# Altium integrated library OK0110_Motorized_Door_Lock_V2.0.IntLib: 45 symbols
Pins are listed as number, name and electrical type; pins without a type are passive.

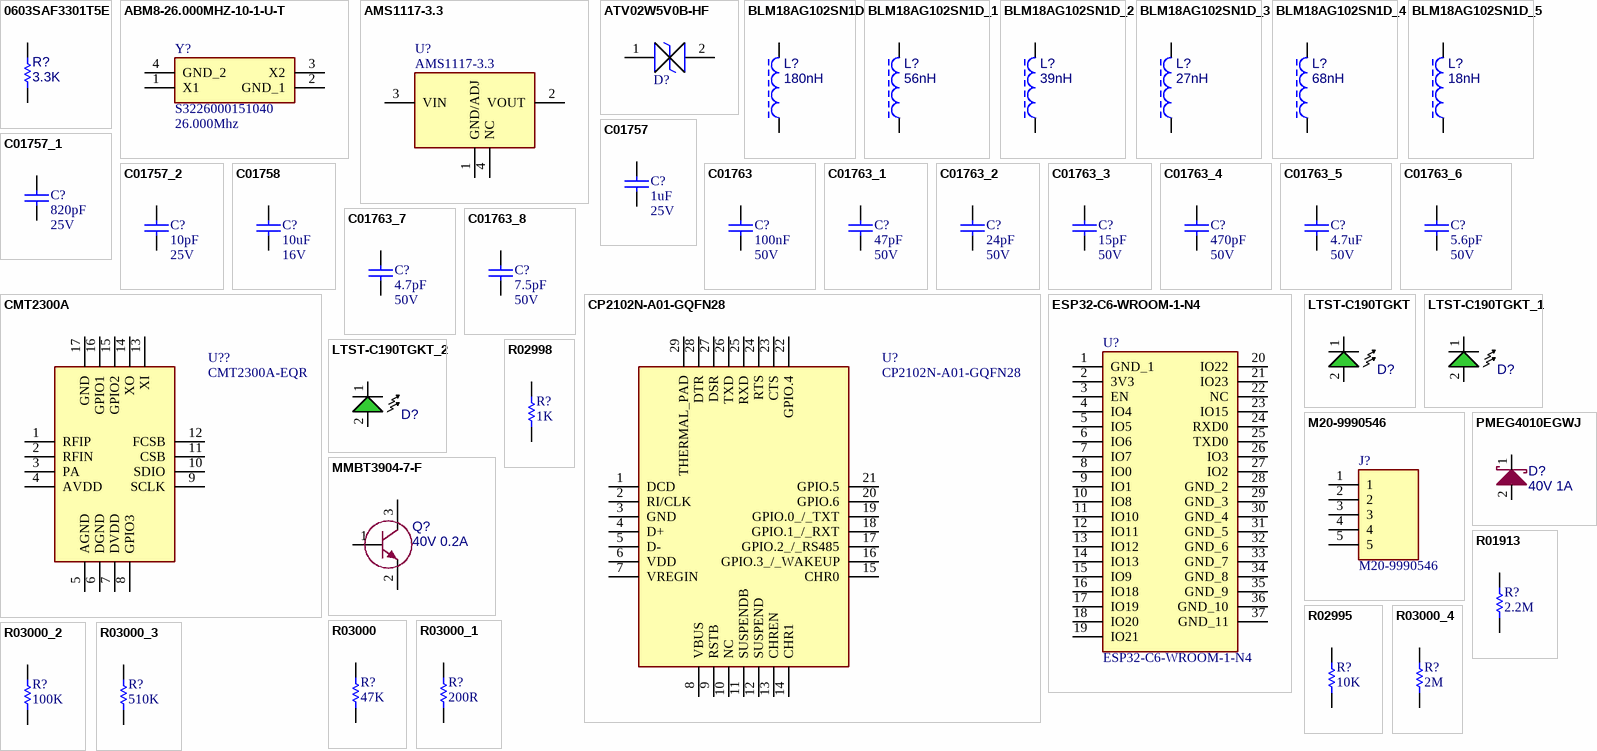
[diagram p0: symbols 0603SAF3301T5E to R03000_4]

## 0603SAF3301T5E
designator R?  value 3.3K  (hidden comment: 0603SAF3301T5E)
RES.(1608) 0603 3.3K Ohms 1% 1/10W 100PPM SMT; Manufacturer: YAGEO; Manufacturer Part Number: RC0603FR-073K74L
footprint RES_0603
pins: 1, 2

## ABM8-26.000MHZ-10-1-U-T
designator Y?, comment S3226000151040  value 26.000Mhz
CRYSTAL 26MHz 15pF SMD; Manufacturer_Name: JGHC; Datasheet Link: https://abracon.com/Resonators/abm8.pdf; Manufacturer_Part_Number: S3226000151040; Mouser Part Number: 815-ABM8-26-T; Mouser Price/Stock: https://www.mouser.co.uk/ProductDetail/ABRACON/ABM8-26.000MHZ-10-1-U-T?qs=76dmnhCH%2FMP1JRP6EvWbSw%3D%3D; Arrow Part Number: ABM8-26.000MHZ-10-1-U-T; Arrow Price/Stock: https://www.arrow.com/en/products/abm8-26.000mhz-10-1-u-t/abracon?utm_currency=USD&region=nac
footprint ABM810000MHZ12D2W
pins: 1 X1, 2 GND_1, 3 X2, 4 GND_2

## AMS1117-3.3
designator U?
Linear Voltage Regulator IC Positive Fixed 1 Output 1A SOT-223-3L; Manufacturer: Advanced; Manufacturer Part Number: AMS1117-3.3
footprint SOT229P700X180-4N
pins: 1 GND/ADJ, 2 VOUT, 3 VIN, 4 NC

## ATV02W5V0B-HF
designator D?  (value not drawn)
9.2V Clamp 21.74A Ipp Tvs Diode Surface Mount SOD-123F; Manufacturer: Comchip Technology; Manufacturer Part Number: ATV02W5V0B-HF
footprint SODFL3718X130N
pins: 1, 2

## BLM18AG102SN1D
designator L?  value 180nH  (hidden comment: BLM18AG102SN1D)
FERRITE BEAD 0603 1K 400MA MURATA; Package: 0603 (1608 Metric); Manufacturer: MURATA; Manufacturer Part Number: BLM18AG102SN1D; Supplier Part Number 1: BLM18AG102SN1D; Supplier Part Number 2: 490-1015-2-ND; Supplier Part Number 3: 81-BLM11A102S; Supplier 1: OZDISAN; Supplier 2: DIGIKEY; Supplier 3: MOUSER
footprint RES_0603
pins: 1, 2

## BLM18AG102SN1D_1
designator L?, comment value 56nH  (hidden comment: BLM18AG102SN1D)
FERRITE BEAD 0603 1K 400MA MURATA; Package: 0603 (1608 Metric); Manufacturer: MURATA; Manufacturer Part Number: BLM18AG102SN1D; Supplier Part Number 1: BLM18AG102SN1D; Supplier Part Number 2: 490-1015-2-ND; Supplier Part Number 3: 81-BLM11A102S; Supplier 1: OZDISAN; Supplier 2: DIGIKEY; Supplier 3: MOUSER
footprint RES_0603
pins: 1, 2

## BLM18AG102SN1D_2
designator L?, comment value 39nH  (hidden comment: BLM18AG102SN1D)
FERRITE BEAD 0603 1K 400MA MURATA; Package: 0603 (1608 Metric); Manufacturer: MURATA; Manufacturer Part Number: BLM18AG102SN1D; Supplier Part Number 1: BLM18AG102SN1D; Supplier Part Number 2: 490-1015-2-ND; Supplier Part Number 3: 81-BLM11A102S; Supplier 1: OZDISAN; Supplier 2: DIGIKEY; Supplier 3: MOUSER
footprint RES_0603
pins: 1, 2

## BLM18AG102SN1D_3
designator L?, comment value 27nH  (hidden comment: BLM18AG102SN1D)
FERRITE BEAD 0603 1K 400MA MURATA; Package: 0603 (1608 Metric); Manufacturer: MURATA; Manufacturer Part Number: BLM18AG102SN1D; Supplier Part Number 1: BLM18AG102SN1D; Supplier Part Number 2: 490-1015-2-ND; Supplier Part Number 3: 81-BLM11A102S; Supplier 1: OZDISAN; Supplier 2: DIGIKEY; Supplier 3: MOUSER
footprint RES_0603
pins: 1, 2

## BLM18AG102SN1D_4
designator L?, comment value 68nH  (hidden comment: BLM18AG102SN1D)
FERRITE BEAD 0603 1K 400MA MURATA; Package: 0603 (1608 Metric); Manufacturer: MURATA; Manufacturer Part Number: BLM18AG102SN1D; Supplier Part Number 1: BLM18AG102SN1D; Supplier Part Number 2: 490-1015-2-ND; Supplier Part Number 3: 81-BLM11A102S; Supplier 1: OZDISAN; Supplier 2: DIGIKEY; Supplier 3: MOUSER
footprint RES_0603
pins: 1, 2

## BLM18AG102SN1D_5
designator L?, comment value 18nH  (hidden comment: BLM18AG102SN1D)
FERRITE BEAD 0603 1K 400MA MURATA; Package: 0603 (1608 Metric); Manufacturer: MURATA; Manufacturer Part Number: BLM18AG102SN1D; Supplier Part Number 1: BLM18AG102SN1D; Supplier Part Number 2: 490-1015-2-ND; Supplier Part Number 3: 81-BLM11A102S; Supplier 1: OZDISAN; Supplier 2: DIGIKEY; Supplier 3: MOUSER
footprint RES_0603
pins: 1, 2

## C01757
designator C?, comment value 1uF  Voltage: 25V  (hidden comment: CL10A105KA8NNNC)
CAP CER 1UF 25VDC %10 X5R SMD; Manufacturer: Samsung; Manufacturer Part Number: CL10A105KA8NNNC
footprint CAP_0603
pins: 1, 2

## C01757_1
designator C?, comment value 820pF  Voltage: 25V  (hidden comment: CL10A105KA8NNNC)
CAP CER 1UF 25VDC %10 X5R SMD; Manufacturer: Samsung; Manufacturer Part Number: CL10A105KA8NNNC
footprint CAP_0603
pins: 1, 2

## C01757_2
designator C?, comment value 10pF  Voltage: 25V  (hidden comment: CL10A105KA8NNNC)
CAP CER 1UF 25VDC %10 X5R SMD; Manufacturer: Samsung; Manufacturer Part Number: CL10A105KA8NNNC
footprint CAP_0603
pins: 1, 2

## C01758
designator C?, comment value 10uF  Voltage: 16V  (hidden comment: CAP)
CAP CER 10UF 16VDC %10 X5R SMD; Manufacturer: Samsung; Manufacturer Part Number: CL21A106KOQNNNE
footprint CAP_0805
pins: 1, 2

## C01763
designator C?, comment value 100nF  Voltage: 50V  (hidden comment: CAP)
CAP CER 100nF 50VDC %10 X7R SMD; Manufacturer: Samsung; Manufacturer Part Number: CL10B104KB8NNNL
footprint CAP_0603
pins: 1, 2

## C01763_1
designator C?, comment value 47pF  Voltage: 50V  (hidden comment: CAP)
CAP CER 100nF 50VDC %10 X7R SMD; Manufacturer: Samsung; Manufacturer Part Number: CL10B104KB8NNNL
footprint CAP_0603
pins: 1, 2

## C01763_2
designator C?, comment value 24pF  Voltage: 50V  (hidden comment: CAP)
CAP CER 100nF 50VDC %10 X7R SMD; Manufacturer: Samsung; Manufacturer Part Number: CL10B104KB8NNNL
footprint CAP_0603
pins: 1, 2

## C01763_3
designator C?, comment value 15pF  Voltage: 50V  (hidden comment: CAP)
CAP CER 100nF 50VDC %10 X7R SMD; Manufacturer: Samsung; Manufacturer Part Number: CL10B104KB8NNNL
footprint CAP_0603
pins: 1, 2

## C01763_4
designator C?, comment value 470pF  Voltage: 50V  (hidden comment: CAP)
CAP CER 100nF 50VDC %10 X7R SMD; Manufacturer: Samsung; Manufacturer Part Number: CL10B104KB8NNNL
footprint CAP_0603
pins: 1, 2

## C01763_5
designator C?, comment value 4.7uF  Voltage: 50V  (hidden comment: CAP)
CAP CER 100nF 50VDC %10 X7R SMD; Manufacturer: Samsung; Manufacturer Part Number: CL10B104KB8NNNL
footprint CAP_0603
pins: 1, 2

## C01763_6
designator C?, comment value 5.6pF  Voltage: 50V  (hidden comment: CAP)
CAP CER 100nF 50VDC %10 X7R SMD; Manufacturer: Samsung; Manufacturer Part Number: CL10B104KB8NNNL
footprint CAP_0603
pins: 1, 2

## C01763_7
designator C?, comment value 4.7pF  Voltage: 50V  (hidden comment: CAP)
CAP CER 100nF 50VDC %10 X7R SMD; Manufacturer: Samsung; Manufacturer Part Number: CL10B104KB8NNNL
footprint CAP_0603
pins: 1, 2

## C01763_8
designator C?, comment value 7.5pF  Voltage: 50V  (hidden comment: CAP)
CAP CER 100nF 50VDC %10 X7R SMD; Manufacturer: Samsung; Manufacturer Part Number: CL10B104KB8NNNL
footprint CAP_0603
pins: 1, 2

## CMT2300A
designator U??, comment CMT2300A-EQR
Ultra-low-power Sub-1GHz RF transceiver; Manufacturer_Name: Hope Microelectronics; Datasheet Link: http://www.cmostek.com/download/CMT2300A-CN-Rev0.7.pdf; Height: 0.8mm; Manufacturer_Part_Number: CMT2300A-EQR
footprint QFN50P300X300X80-17N-D
pins: 1 RFIP, 2 RFIN, 3 PA, 4 AVDD, 5 AGND, 6 DGND, 7 DVDD, 8 GPIO3, 9 SCLK, 10 SDIO, 11 CSB, 12 FCSB, 13 XI, 14 XO, 15 GPIO2, 16 GPIO1, 17 GND

## CP2102N-A01-GQFN28
designator U?
USB Bridge, USB to UART USB 2.0 UART Interface 28-QFN (5x5); Manufacturer: Silicon Labs; Manufacturer Part Number: CP2102N-A01-GQFN28
footprint QFN50P500X500X80-29N-D
pins: 1 DCD, 2 RI/CLK, 3 GND, 4 D+, 5 D-, 6 VDD, 7 VREGIN, 8 VBUS, 9 RSTB, 10 NC, 11 SUSPENDB, 12 SUSPEND, 13 CHREN, 14 CHR1, 15 CHR0, 16 GPIO.3_/_WAKEUP, 17 GPIO.2_/_RS485, 18 GPIO.1_/_RXT, 19 GPIO.0_/_TXT, 20 GPIO.6, 21 GPIO.5, 22 GPIO.4, 23 CTS, 24 RTS, 25 RXD, 26 TXD, 27 DSR, 28 DTR, 29 THERMAL_PAD

## ESP32-C6-WROOM-1-N4
designator U?
Manufacturer: Espressif Systems; Manufacturer Part Number: ESP32-C6-WROOM-1-N4
footprint ESP32C6WROOM1N4
pins: 1 GND_1, 2 3V3, 3 EN, 4 IO4, 5 IO5, 6 IO6, 7 IO7, 8 IO0, 9 IO1, 10 IO8, 11 IO10, 12 IO11, 13 IO12, 14 IO13, 15 IO9, 16 IO18, 17 IO19, 18 IO20, 19 IO21, 20 IO22, 21 IO23, 22 NC, 23 IO15, 24 RXD0, 25 TXD0, 26 IO3, 27 IO2, 28 GND_2, 29 GND_3, 30 GND_4, 31 GND_5, 32 GND_6, 33 GND_7, 34 GND_8, 35 GND_9, 36 GND_10, 37 GND_11

## LTST-C190TGKT
designator D?, comment HL-PT-1608S52FC-L  (value not drawn)
LED RED WATER CLEAR 0603 SMD; Manufacturer: HONGLITRONIC; Manufacturer Part Number: HL-PT-1608S52FC-L; Value: RED
footprint LED_0603_GRN
pins: 1, 2

## LTST-C190TGKT_1
designator D?, comment HL-PT-1608H392BC-L  (value not drawn)
LED BLUE WATER CLEAR 0603 SMD; Manufacturer: HONGLITRONIC; Manufacturer Part Number: HL-PT-1608H392BC-L; Value: BLUE
footprint LED_0603_GRN
pins: 1, 2

## LTST-C190TGKT_2
designator D?, comment PSC-1608U52GC-G4  (value not drawn)
LED GREEN WATER CLEAR 0603 SMD; Manufacturer: HONGLITRONIC; Manufacturer Part Number: PSC-1608U52GC-G4; Value: GREEN
footprint LED_0603_GRN
pins: 1, 2

## M20-9990546
designator J?  (no BOM)
Connector; Manufacturer_Name: Harwin; Datasheet Link: https://content.harwin.com/m/0df15f6e0f9f48e2/original/DRG-00479-Technical-Drawing-Datasheet-M20-999-pdf.pdf; Height: 8.64mm; Manufacturer_Part_Number: M20-9990546; Mouser Part Number: 855-M20-9990546; Mouser Price/Stock: https://www.mouser.co.uk/ProductDetail/Harwin/M20-9990546?qs=ulE8k0yEMYY8EKyDN9ic6A%3D%3D
footprint HDRV5W64P0X254_1X5_1270X254X864P
pins: 1, 2, 3, 4, 5

## MMBT3904-7-F
designator Q?  value 40V 0.2A  (hidden comment: MMBT3904-7-F)
TRANSISTOR NPN 40V 0.2A SOT23-3; Manufacturer: Diodes Incorporated; Manufacturer Part Number: MMBT3904-7-F
footprint SOT23
pins: 1 B, 2 E, 3 C

## PMEG4010EGWJ
designator D?  value 40V 1A  (hidden comment: PMEG4010EGWJ)
DIODE SCHOTTKY 40V 1A SOD123; Manufacturer: Nexperia USA Inc.; Manufacturer Part Number: PMEG4010EGWJ
footprint SOD-123 (SOD, 2-Leads, Body 2.69x1.6mm)
pins: 1, 2

## R01913
designator R?, comment value 2.2M  (hidden comment: RES)
RES SMD 2.2M OHM 1% 1/8W 0805; Manufacturer: Yageo; Manufacturer Part Number: RC0805FR-072M2L
footprint RES_0805
pins: 1, 2

## R02995
designator R?, comment value 10K  (hidden comment: RES)
RES 0603 10k Ohms %1 1/10W 100PPM; Manufacturer: ROYALOHM; Manufacturer Part Number: 0603SAF1002T5E
footprint RES_0603
pins: 1, 2

## R02998
designator R?, comment value 1K  (hidden comment: RES)
RES 0603 1K Ohms 1% 1/10W-S 100PPM; Manufacturer: ROYALOHM; Manufacturer Part Number: 0603SAF1001T5E
footprint RES_0603
pins: 1, 2

## R03000
designator R?, comment value 47K  (hidden comment: RES)
RES 0603 47K Ohms 1% 1/10W-S 100PPM; Manufacturer: ROYALOHM; Manufacturer Part Number: 0603SAF4702T5E
footprint RES_0603
pins: 1, 2

## R03000_1
designator R?, comment value 200R  (hidden comment: RES)
RES 0603 47K Ohms 1% 1/10W-S 100PPM; Manufacturer: ROYALOHM; Manufacturer Part Number: 0603SAF4702T5E
footprint RES_0603
pins: 1, 2

## R03000_2
designator R?, comment value 100K  (hidden comment: RES)
RES 0603 47K Ohms 1% 1/10W-S 100PPM; Manufacturer: ROYALOHM; Manufacturer Part Number: 0603SAF4702T5E
footprint RES_0603
pins: 1, 2

## R03000_3
designator R?, comment value 510K  (hidden comment: RES)
RES 0603 47K Ohms 1% 1/10W-S 100PPM; Manufacturer: ROYALOHM; Manufacturer Part Number: 0603SAF4702T5E
footprint RES_0603
pins: 1, 2

## R03000_4
designator R?, comment value 2M  (hidden comment: RES)
RES 0603 47K Ohms 1% 1/10W-S 100PPM; Manufacturer: ROYALOHM; Manufacturer Part Number: 0603SAF4702T5E
footprint RES_0603
pins: 1, 2

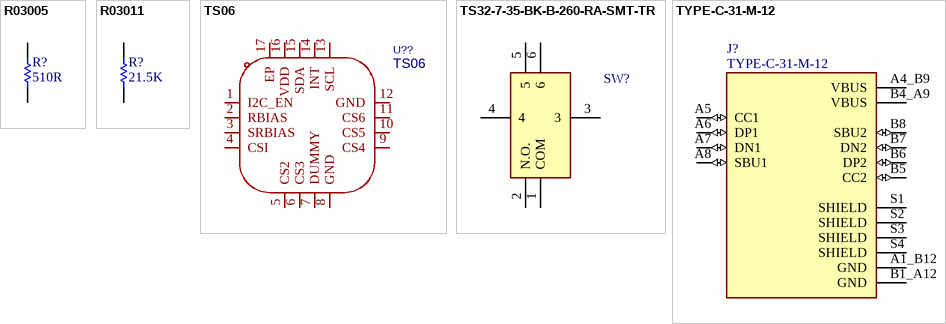
[diagram p1: symbols R03005 to TYPE-C-31-M-12]

## R03005
designator R?, comment value 510R  (hidden comment: 0603SAJ0511T5E)
RES.(1608) 0603 510 Ohms 5% 1/10W-S 100PPM; Manufacturer: ROYALOHM; Manufacturer Part Number: 0603SAJ0511T5E
footprint R0603
pins: 1, 2

## R03011
designator R?, comment value 21.5K  (hidden comment: 0603SAF2152T5E)
RES.(1608) 0603 21.5K Ohms 1% 1/10W-S 100PPM; Manufacturer: ROYALOHM; Manufacturer Part Number: 0603SAF2152T5E
footprint RES_0603
pins: 1, 2

## TS06
designator U??
Number of Channels:6 Features:Capacitive Touch；PWM Control；Automatic sensitivity calibration；Integrated LED driver Whether the Lock:- Voltage - Supply:2.5V~5V Voltage - Supply:2.5V~5V Current - Supply:80uA Operating Temperature:-20℃~+75℃ Operating Tempera; Manufacturer: AD Semiconductor; AddInBom: yes; ModelId: 70b6265379b441acae380b40a6ebf137; ModelName: QFN-16_L3.0-W3.0-P0.50-EP2.0; ModelTransform: 118.8974,118.8974,0,90,0,0,0,0,0; Number of Channels: 6; Current - Supply: 80uA; Standby Current: 8uA; ESD Protection Voltage: 5kV; Symbol: TS06; LCSC Part Name: 6通道自动灵敏度校准电容式触摸传感器; SupplierPart: C132386; ManufacturerPart: TS06; Supplier Footprint: QFN-16-EP(3x3); JLCPCB Part Class: Extended Part; Datasheet: https://item.szlcsc.com/datasheet/TS06/143685.html; Supplier: LCSC; ConvertToPcb: yes; FootprintName: QFN-16_L3.0-W3.0-P0.50-BL-EP2.0; Features: Capacitive Touch；PWM Control；Automatic sensitivity calibration；Integrated LED driver; Whether the Lock: -; Voltage - Supply: 2.5V~5V; Operating Temperature: -20℃~+75℃; Response Time (tr): -
footprint QFN-16_L3.0-W3.0-P0.50-BL-EP2.0
pins: 1 I2C_EN, 2 RBIAS, 3 SRBIAS, 4 CSI, 5 CS2, 6 CS3, 7 DUMMY, 8 GND, 9 CS4, 10 CS5, 11 CS6, 12 GND, 13 SCL, 14 INT, 15 SDA, 16 VDD, 17 EP

## TS32-7-35-BK-B-260-RA-SMT-TR
designator SW?  (value not drawn)
Manufacturer: Same Sky; Manufacturer Part Number: TS32-7-35-BK-B-260-RA-SMT-TR
footprint TS32735BKB160RAHSMTTR
pins: 1 COM, 2 N.O., 3, 4, 5, 6

## TYPE-C-31-M-12
designator J?
USB Connectors 24 Receptacle 1 8.94*7.3mm RoHS; Manufacturer: HRO Electronics Co., Ltd.; Value: TYPE-C-31-M-12; Manufacturer Part Number: TYPE-C-31-M-12
footprint HRO_TYPE-C-31-M-12
pins: A1_B12 GND (power), A4_B9 VBUS (power), A5 CC1 (io), A6 DP1 (io), A7 DN1 (io), A8 SBU1 (io), B1_A12 GND (power), B4_A9 VBUS (power), B5 CC2 (io), B6 DP2 (io), B7 DN2 (io), B8 SBU2 (io), S1 SHIELD, S2 SHIELD, S3 SHIELD, S4 SHIELD